# Altium integrated library Altium_Power_Supply_IC.IntLib: 99 symbols (part 1 of 3)
Pins are listed as number, name and electrical type; pins without a type are passive.

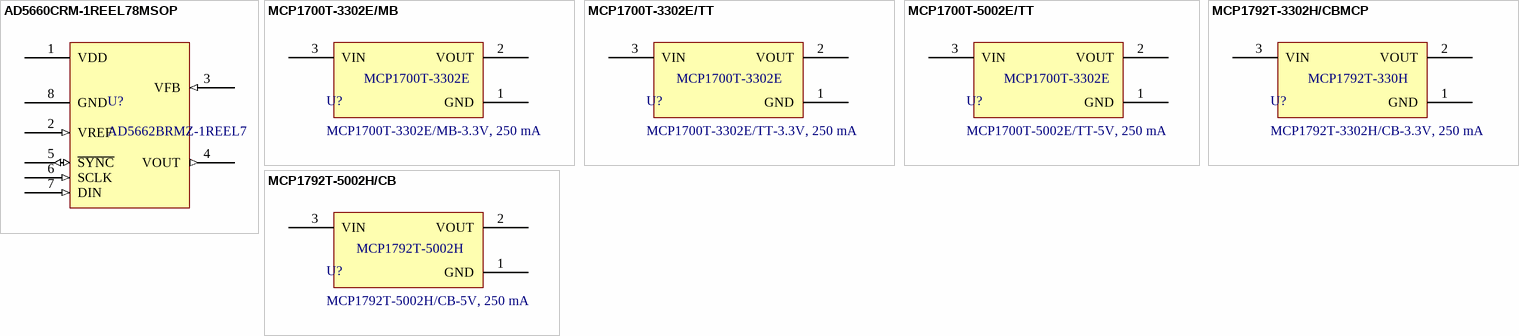
[diagram p0: symbols AD5660CRM-1REEL78MSOP to MCP1792T-5002H/CB]

## AD5660CRM-1REEL78MSOP
designator U?, comment AD5662BRMZ-1REEL7
IC DAC 16BIT V-OUT 8MSOP,; Manufacturer: Analog Devices; Number of Converters: 1; Power Dissipation: 5 mW; Sampling Rate: 125 kS/s; Supply Voltage - Max: 5.5 V; Supply Voltage - Min: 2.7 V; Resolution: 16 bit; Supplier 1 URL: https://www.mouser.vn/ProductDetail/Analog-Devices/AD5662BRMZ-1REEL7?qs=NmRFExCfTkGSnX5okAm7Ig%3D%3D; Supplier 2 URL: https://www.digikey.com/en/products/detail/analog-devices-inc/ad5662brmz-1reel7/1198991; Supplier 3 URL: N/A; Value: AD5662BRMZ-1REEL7; Supplier 1: Mouser; Supplier 1 Part Number: 584-AD5662BRMZ-1R7; Supplier 2: Digi-Key; Supplier 2 Part Number: AD5662BRMZ-1REEL7TR-ND; Supplier 3: thegioiic; Supplier 3 Part Number: N/A; Manufacturer Part Number: AD5662BRMZ-1REEL7; Mount: SMD/SMT; Operating Temperature Max: + 85 C; Operating Temperature Min: - 40 C; Package / Case: MSOP-8; Packaging: Tape and Reel; ComponentLink1Description: Datasheet; ComponentLink1URL: https://www.analog.com/media/en/technical-documentation/data-sheets/AD5620_5640_5660.pdf
footprint AD5662xx family (TSOP, 8-Leads, Body 3.00x3.00mm, Pitch 0.65mm, IPC Medium Density)
pins: 1 VDD (power), 2 VREF (in), 3 VFB (in), 4 VOUT (out), 5 ~{SYNC} (io), 6 SCLK (in), 7 DIN (in), 8 GND (power)

## MCP1700T-3302E/MB
designator U?, comment MCP1700T-3302E/MB-3.3V, 250 mA
LDO Voltage Regulators 250mA Adj LDO 2%; Manufacturer: Microchip Technology; Voltage Input: 2.3V - 6V; Voltage Output: 3.3V; Manufacturer Part Number: MCP1700T-3302E/MB; Current Output: 250mA; Supplier 1 URL: https://www.mouser.com/ProductDetail/Microchip-Technology/MCP1700T-3302E-MB?qs=WWgnj3qycfnlJJhwyn%2Fifw%3D%3D; Supplier 2 URL: https://www.digikey.com/en/products/detail/microchip-technology/MCP1700T-3302E-MB/652678; Supplier 3 URL: https://www.thegioiic.com/mcp1700t-3302e-mb-ic-on-ap-3-3v-250ma; Value: MCP1700T-3302E/MB-3.3V, 250 mA; Mount: SMD/SMT; Operating Temperature Max: + 85 C; Operating Temperature Min: - 40 C; Packaging: Tape and Reel; Supplier 1: Mouser; Supplier 1 Part Number: 579-MCP1700T3302E/MB; Supplier 2: Digi-Key; Supplier 2 Part Number: MCP1700T3302EMBTR-ND; Supplier 3: thegioiic; Supplier 3 Part Number: N/A; ComponentLink1Description: Datasheet; ComponentLink1URL: https://www.mouser.com/datasheet/2/268/MCP1700_Data_Sheet_20001826F-737536.pdf
footprint MCP1700T-3302E/MB (SOT89, 3-Leads, Body 4.50x2.21mm, Pitch 1.50mm, Lead Span 4.1mm)
pins: 1 GND (power), 2 VOUT (power), 3 VIN (power)
text: MCP1700T-3302E

## MCP1700T-3302E/TT
designator U?, comment MCP1700T-3302E/TT-3.3V, 250 mA
Linear Voltage Regulator IC Positive Fixed 1 Output 250mA SOT-23-3; Manufacturer: Microchip Technology; Voltage Input: 2.3V - 6V; Voltage Output: 3.3V; Manufacturer Part Number: MCP1700T-3302E/TT; Current Output: 250mA; Supplier 1 URL: https://www.mouser.com/ProductDetail/Microchip-Technology/MCP1700T-3302E-TT?qs=fM4xO01eazPmCNDrdHEdaw%3D%3D; Supplier 2 URL: https://www.digikey.com/en/products/detail/microchip-technology/MCP1700T-3302E-TT/652676; Supplier 3 URL: https://www.thegioiic.com/mcp1700t-3302e-ic-on-ap-3-3v-250ma; Value: MCP1700T-3302E/TT-3.3V, 250 mA; Mount: SMD/SMT; Operating Temperature Max: + 85 C; Operating Temperature Min: - 40 C; Packaging: Tape and Reel; Supplier 1: Mouser; Supplier 1 Part Number: 579-MCP1700T3302E/TT; Supplier 2: Digi-Key; Supplier 2 Part Number: MCP1700T3302ETTTR-ND; Supplier 3: thegioiic; Supplier 3 Part Number: N/A; ComponentLink1Description: Datasheet; ComponentLink1URL: https://www.mouser.com/datasheet/2/268/MCP1700_Data_Sheet_20001826F-737536.pdf
footprint MCP1700T-3302E/TT (SOT23, 3-Leads, Body 2.86x2.37mm, Pitch 0.95mm)
pins: 1 GND (power), 2 VOUT (power), 3 VIN (power)
text: MCP1700T-3302E

## MCP1700T-5002E/TT
designator U?, comment MCP1700T-5002E/TT-5V, 250 mA
IC REG LINEAR 5V 250MA SOT23-3; Manufacturer: Microchip Technology; Voltage Input: 2.3V - 6V; Manufacturer Part Number: MCP1700T-5002E/TT; Voltage Output: 5V; Current Output: 250mA; Supplier 1 URL: https://www.mouser.com/ProductDetail/Microchip-Technology/MCP1700T-5002E-TT?qs=fM4xO01eazNr4AnStMRB%2Fg%3D%3D; Supplier 2 URL: https://www.digikey.com/en/products/detail/microchip-technology/MCP1700T-5002E-TT/652681; Supplier 3 URL: https://www.thegioiic.com/mcp1700t-5002e-mb-ic-on-ap-5v-250ma; Value: MCP1700T-5002E/TT-5V, 250 mA; Mount: SMD/SMT; Operating Temperature Max: + 85 C; Operating Temperature Min: - 40 C; Packaging: Tape and Reel; Supplier 1: Mouser; Supplier 1 Part Number: 579-MCP1700T5002E/TT; Supplier 2: Digi-Key; Supplier 2 Part Number: MCP1700T5002ETTTR-ND; Supplier 3: thegioiic; Supplier 3 Part Number: N/A; ComponentLink1Description: Datasheet; ComponentLink1URL: https://www.mouser.com/datasheet/2/268/MCP1700_Data_Sheet_20001826F-737536.pdf
footprint MCP1700T-5002E/TT (SOT23, 3-Leads, Body 2.86x2.37mm, Pitch 0.95mm)
pins: 1 GND (power), 2 VOUT (power), 3 VIN (power)
text: MCP1700T-3302E

## MCP1792T-3302H/CBMCP
designator U?, comment MCP1792T-3302H/CB-3.3V, 250 mA
LDO Voltage Regulators High input voltage regulator 3.3V 3Ld SOT-23A TR.; Manufacturer: Microchip Technology; Voltage Input: 4.5V - 55V; Current Output: 100mA; Manufacturer Part Number: MCP1792T-3302H/CB; Voltage Output: 3.3V; Supplier 1 URL: https://www.mouser.com/ProductDetail/Microchip-Technology/MCP1792T-3302H-CB?qs=mAH9sUMRCtsJR7ybQ6HmQA%3D%3D; Supplier 2 URL: https://www.digikey.com/en/products/detail/microchip-technology/MCP1792T-3302H-CB/10297921; Supplier 3 URL: N/A; Value: MCP1792T-3302H/CB-3.3V, 250 mA; Mount: SMD/SMT; Operating Temperature Max: + 85 C; Operating Temperature Min: - 40 C; Packaging: Tape and Reel; Supplier 1: Mouser; Supplier 1 Part Number: 579-MCP1792T-3302HCB; Supplier 2: Digi-Key; Supplier 2 Part Number: MCP1792T-3302H/CBTR-ND; Supplier 3: thegioiic; Supplier 3 Part Number: N/A; ComponentLink1Description: Datasheet; ComponentLink1URL: https://www.mouser.com/datasheet/2/268/MCP1792_Family_Data_Sheet_DS20006229D-2891803.pdf
footprint MCP1792T-3302H/CB (SOT23, 3-Leads, Body 2.90x2.55mm, Pitch 0.95mm)
pins: 1 GND (power), 2 VOUT (power), 3 VIN (power)
text: MCP1792T-330H

## MCP1792T-5002H/CB
designator U?, comment MCP1792T-5002H/CB-5V, 250 mA
LDO Voltage Regulators High input voltage regulator 5.0 V 3Ld SOT-23A TR; Manufacturer: Microchip Technology; Voltage Input: 4.5V - 55V; Voltage Output: 5V; Current Output: 100mA; Manufacturer Part Number: MCP1792T-5002H/CB; Supplier 1 URL: https://www.mouser.com/ProductDetail/Microchip-Technology/MCP1792T-5002H-CB?qs=mAH9sUMRCtuAXaaRege0yg%3D%3D; Supplier 2 URL: https://www.digikey.com/en/products/detail/microchip-technology/MCP1792T-5002H-CB/10297923; Supplier 3 URL: N/A; Value: MCP1792T-5002H/CB-5V, 250 mA; Mount: SMD/SMT; Operating Temperature Max: + 85 C; Operating Temperature Min: - 40 C; Packaging: Tape and Reel; Supplier 1: Mouser; Supplier 1 Part Number: 579-MCP1792T-5002HCB; Supplier 2: Digi-Key; Supplier 2 Part Number: MCP1792T-5002H/CBTR-ND; Supplier 3: thegioiic; Supplier 3 Part Number: N/A; ComponentLink1Description: Datasheet; ComponentLink1URL: https://www.mouser.com/datasheet/2/268/MCP1792_Family_Data_Sheet_DS20006229D-2891803.pdf
footprint MCP1792T-5002HCB (SOT23, 3-Leads, Body 2.90x2.55mm, Pitch 0.95mm)
pins: 1 GND (power), 2 VOUT (power), 3 VIN (power)
text: MCP1792T-5002H


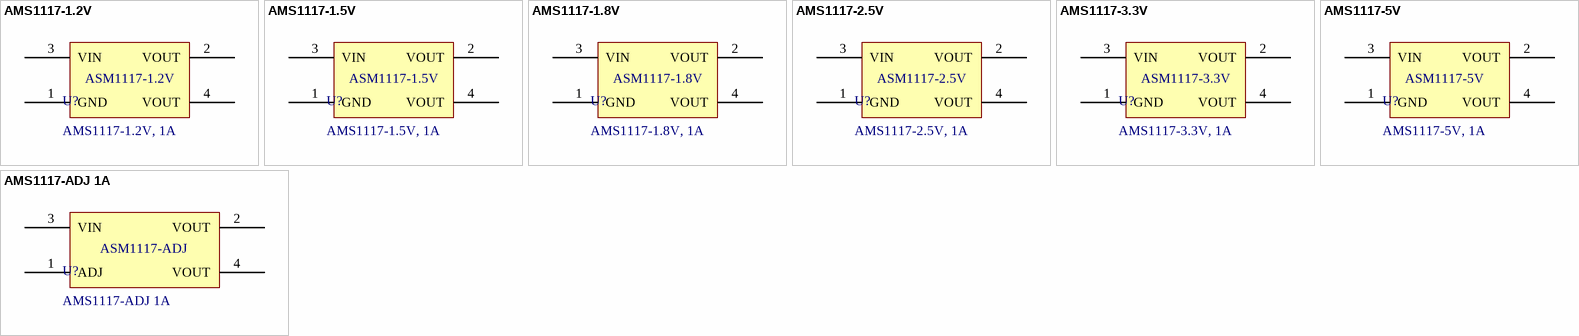
[diagram p1: symbols AMS1117-1.2V to AMS1117-ADJ 1A]

## AMS1117-1.2V
designator U?, comment AMS1117-1.2V, 1A
AMS1117-1.2V, OUT 1.2V 1A.; Manufacturer: AMS; Pad Count: 4; Voltage Input Maximum: 15V; Manufacturer Part Number: N/A; Current Input Maximum: N/A; Current Output Maximum: 1A; Voltage Output: 1.2V; Supplier 1 URL: N/A; Supplier 2 URL: N/A; Supplier 3 URL: https://www.thegioiic.com/ams1117-1-2v-ic-on-ap-1-2v-1a-sot-223; Value: AMS1117-1.2V, 1A; Mount: SMD/SMT; Operating Temperature Max: + 85 C; Operating Temperature Min: - 40 C; Packaging: Tape and Reel; Supplier 1: Mouser; Supplier 1 Part Number: N/A; Supplier 2: Digi-Key; Supplier 2 Part Number: N/A; Supplier 3: thegioiic; Supplier 3 Part Number: N/A; ComponentLink1Description: Datasheet; ComponentLink1URL: N/A; LCSC Part #: N/A
footprint AMS1117-1.2V SOT223 (SOT223, 4-Leads, Body 6.51x7.00mm, Pitch 2.29mm)
pins: 1 GND (power), 2 VOUT, 3 VIN, 4 VOUT (power)
text: ASM1117-1.2V

## AMS1117-1.5V
designator U?, comment AMS1117-1.5V, 1A
AMS1117-1.5V, OUT 1.5V 1A.; Manufacturer: AMS; Pad Count: 4; Voltage Input Maximum: 15V; Manufacturer Part Number: N/A; Current Input Maximum: N/A; Current Output Maximum: 1A; Voltage Output: 1.5V; Supplier 1 URL: N/A; Supplier 2 URL: N/A; Supplier 3 URL: https://www.thegioiic.com/ams1117-1-5v-ic-on-ap-1-5v-1a-sot-223; Value: AMS1117-1.5V, 1A; Mount: SMD/SMT; Operating Temperature Max: + 85 C; Operating Temperature Min: - 40 C; Packaging: Tape and Reel; Supplier 1: Mouser; Supplier 1 Part Number: N/A; Supplier 2: Digi-Key; Supplier 2 Part Number: N/A; Supplier 3: thegioiic; Supplier 3 Part Number: N/A; ComponentLink1Description: Datasheet; ComponentLink1URL: http://www.ams-semitech.com/attachments/File/AMS1117_20120314.pdf; LCSC Part #: N/A
footprint AMS1117-1.5V SOT223 (SOT223, 4-Leads, Body 6.51x7.00mm, Pitch 2.29mm)
pins: 1 GND (power), 2 VOUT, 3 VIN, 4 VOUT (power)
text: ASM1117-1.5V

## AMS1117-1.8V
designator U?, comment AMS1117-1.8V, 1A
AMS1117-1.8V, OUT 1.8V 1A.; Manufacturer: AMS; Pad Count: 4; Voltage Input Maximum: 15V; Manufacturer Part Number: N/A; Current Input Maximum: N/A; Current Output Maximum: 1A; Voltage Output: 1.8V; Supplier 1 URL: N/A; Supplier 2 URL: N/A; Supplier 3 URL: https://www.thegioiic.com/ams1117-1-8v-ic-on-ap-1-8v-1a-sot-223; Value: AMS1117-1.8V, 1A; Mount: SMD/SMT; Operating Temperature Max: + 85 C; Operating Temperature Min: - 40 C; Packaging: Tape and Reel; Supplier 1: Mouser; Supplier 1 Part Number: N/A; Supplier 2: Digi-Key; Supplier 2 Part Number: N/A; Supplier 3: thegioiic; Supplier 3 Part Number: N/A; ComponentLink1Description: Datasheet; ComponentLink1URL: N/A; LCSC Part #: N/A
footprint AMS1117-1.8V SOT223 (SOT223, 4-Leads, Body 6.51x7.00mm, Pitch 2.29mm)
pins: 1 GND (power), 2 VOUT, 3 VIN, 4 VOUT (power)
text: ASM1117-1.8V

## AMS1117-2.5V
designator U?, comment AMS1117-2.5V, 1A
AMS1117-2.5V, OUT 2.5V 1A.; Manufacturer: AMS; Pad Count: 4; Voltage Input Maximum: 15V; Manufacturer Part Number: N/A; Current Input Maximum: N/A; Current Output Maximum: 1A; Voltage Output: 2.5V; Supplier 1 URL: N/A; Supplier 2 URL: N/A; Supplier 3 URL: https://www.thegioiic.com/ams1117-2-5v-ic-on-ap-2-5v-1a-sot-223; Value: AMS1117-2.5V, 1A; Mount: SMD/SMT; Operating Temperature Max: + 85 C; Operating Temperature Min: - 40 C; Packaging: Tape and Reel; Supplier 1: Mouser; Supplier 1 Part Number: N/A; Supplier 2: Digi-Key; Supplier 2 Part Number: N/A; Supplier 3: thegioiic; Supplier 3 Part Number: N/A; ComponentLink1Description: Datasheet; ComponentLink1URL: http://www.advanced-monolithic.com/pdf/ds1117.pdf; LCSC Part #: N/A
footprint AMS1117-2.5V SOT223 (SOT223, 4-Leads, Body 6.51x7.00mm, Pitch 2.29mm)
pins: 1 GND (power), 2 VOUT, 3 VIN, 4 VOUT (power)
text: ASM1117-2.5V

## AMS1117-3.3V
designator U?, comment AMS1117-3.3V, 1A
AMS1117-3.3V, OUT 3.3V 1A.; Manufacturer: AMS; Pad Count: 4; Voltage Input Maximum: 15V; Manufacturer Part Number: N/A; Current Input Maximum: N/A; Current Output Maximum: 1A; Voltage Output: 3.3V; Supplier 1 URL: N/A; Supplier 2 URL: N/A; Supplier 3 URL: https://www.thegioiic.com/ams1117-3-3v-ic-on-ap-3-3v-1a-sot-223; Value: AMS1117-3.3V, 1A; Mount: SMD/SMT; Operating Temperature Max: + 85 C; Operating Temperature Min: - 40 C; Packaging: Tape and Reel; Supplier 1: Mouser; Supplier 1 Part Number: N/A; Supplier 2: Digi-Key; Supplier 2 Part Number: N/A; Supplier 3: thegioiic; Supplier 3 Part Number: N/A; ComponentLink1Description: Datasheet; ComponentLink1URL: http://www.advanced-monolithic.com/pdf/ds1117.pdf; LCSC Part #: C347222
footprint AMS1117-3.3V SOT223 (SOT223, 4-Leads, Body 6.51x7.00mm, Pitch 2.29mm)
pins: 1 GND (power), 2 VOUT, 3 VIN, 4 VOUT (power)
text: ASM1117-3.3V

## AMS1117-5V
designator U?, comment AMS1117-5V, 1A
AMS1117-5V, OUT 5V 1A.; Manufacturer: AMS; Pad Count: 4; Voltage Input Maximum: 15V; Manufacturer Part Number: N/A; Current Input Maximum: N/A; Current Output Maximum: 1A; Voltage Output: 5V; Supplier 1 URL: N/A; Supplier 2 URL: N/A; Supplier 3 URL: https://www.thegioiic.com/ams1117-5-0v-ic-on-ap-5v-1a-sot-223; Value: AMS1117-5V, 1A; Mount: SMD/SMT; Operating Temperature Max: + 85 C; Operating Temperature Min: - 40 C; Packaging: Tape and Reel; Supplier 1: Mouser; Supplier 1 Part Number: N/A; Supplier 2: Digi-Key; Supplier 2 Part Number: N/A; Supplier 3: thegioiic; Supplier 3 Part Number: N/A; ComponentLink1Description: Datasheet; ComponentLink1URL: N/A; LCSC Part #: N/A
footprint AMS1117-5V SOT223 (SOT223, 4-Leads, Body 6.51x7.00mm, Pitch 2.29mm)
pins: 1 GND (power), 2 VOUT, 3 VIN, 4 VOUT (power)
text: ASM1117-5V

## AMS1117-ADJ 1A
designator U?
AMS1117-ADJ, OUT 1.2V-5V 800mA, IN 15V 1A; Manufacturer: UMW; Manufacturer Part Number: AMS1117-1.2; Pad Count: 4; Voltage Output: 1.2 - 5V; Current Input Maximum: 1A; Current Output Maximum: 800mA; Voltage Input Maximum: 15V; Supplier 1 URL: N/A; Supplier 2 URL: https://www.digikey.com/en/products/detail/umw/AMS1117-1-2/17635209; Supplier 3 URL: https://www.thegioiic.com/ams1117-adj-ic-dieu-chinh-dien-ap-1a-sot-223; Value: AMS1117-ADJ 1A; Mount: SMD/SMT; Operating Temperature Max: + 85 C; Operating Temperature Min: - 40 C; Packaging: Tape and Reel; Supplier 1: Mouser; Supplier 1 Part Number: N/A; Supplier 2: Digi-Key; Supplier 2 Part Number: 4518-AMS1117-1.2TR-ND; Supplier 3: thegioiic; Supplier 3 Part Number: N/A; ComponentLink1Description: Datasheet; ComponentLink1URL: https://media.digikey.com/pdf/Data%20Sheets/UTD%20Semi%20PDFs/AMS1117.pdf; LCSC Part #: N/A
footprint AMS1117-ADJ SOT223 (SOT223, 4-Leads, Body 6.51x7.00mm, Pitch 2.29mm)
pins: 1 ADJ (power), 2 VOUT, 3 VIN, 4 VOUT (power)
text: ASM1117-ADJ


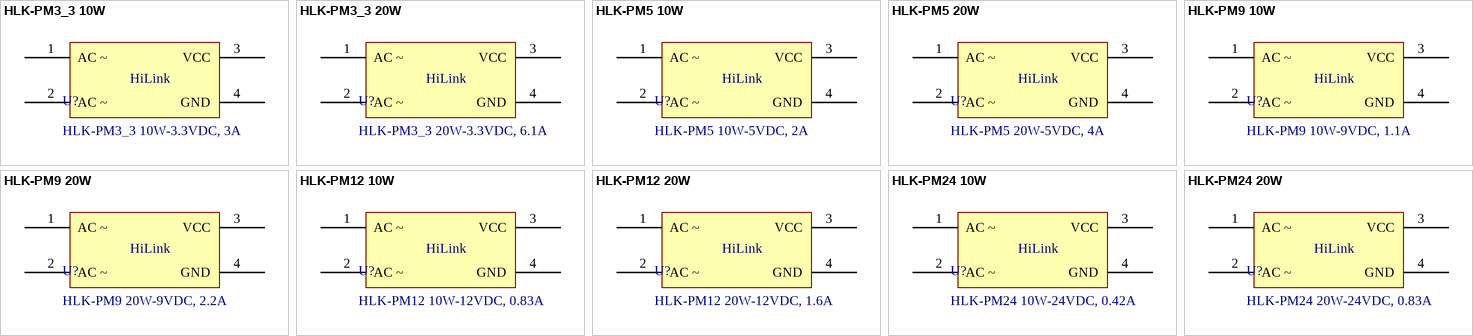
[diagram p2: symbols HLK-PM3_3 10W to HLK-PM24 20W]

## HLK-PM3_3 10W
designator U?, comment HLK-PM3_3 10W-3.3VDC, 3A
HLK-PM3_3 AC-DC 220-3.3V 10W; Manufacturer: Hi-Link Electronic; Voltage Output: 3.3VDC; Voltage Input: 220VAC; Current Output: 3A; Power Output: 10W; ComponentLink1URL: https://www.hlktech.com/en/Product/Details/29; Supplier 1 URL: N/A; Supplier 2 URL: N/A; Supplier 3 SN: HLK-PM3_3 10W; Supplier 3 URL: N/A; Value: HLK-PM3_3 10W-3.3VDC, 3A; Manufacturer Part Number: HLK-PM3_3 AC-DC 220-3.3V 10W; Mount: THT; Operating Temperature Max: + 85 C; Operating Temperature Min: - 40 C; Packaging: Tape and Reel; Supplier 1: Mouser; Supplier 1 Part Number: N/A; Supplier 2: Digi-Key; Supplier 2 Part Number: N/A; Supplier 3: thegioiic; Supplier 3 Part Number: N/A; ComponentLink1Description: Datasheet
footprint HLK-10M
pins: 1 AC ~, 2 AC ~, 3 VCC, 4 GND
text: HiLink

## HLK-PM3_3 20W
designator U?, comment HLK-PM3_3 20W-3.3VDC, 6.1A
HLK-PM3_3 AC-DC 220-3.3V 20W; Manufacturer: Hi-Link Electronic; Voltage Input: 220VAC; Voltage Output: 3.3VDC; Current Output: 6.1A; Power Output: 20W; ComponentLink1URL: https://www.hlktech.com/en/Goods-49.html; Supplier 1 URL: N/A; Supplier 2 URL: N/A; Supplier 3 SN: HLK-PM3_3 20W; Supplier 3 URL: N/A; Value: HLK-PM3_3 20W-3.3VDC, 6.1A; Manufacturer Part Number: HLK-PM3_3 AC-DC 220-3.3V 20W; Mount: THT; Operating Temperature Max: + 85 C; Operating Temperature Min: - 40 C; Packaging: Tape and Reel; Supplier 1: Mouser; Supplier 1 Part Number: N/A; Supplier 2: Digi-Key; Supplier 2 Part Number: N/A; Supplier 3: thegioiic; Supplier 3 Part Number: N/A; ComponentLink1Description: Datasheet
footprint HLK-20M
pins: 1 AC ~, 2 AC ~, 3 VCC, 4 GND
text: HiLink

## HLK-PM5 10W
designator U?, comment HLK-PM5 10W-5VDC, 2A
HLK-PM5 AC-DC 220-5V 10W; Manufacturer: Hi-Link Electronic; Voltage Input: 220VAC; Voltage Output: 5VDC; Power Output: 10W; Current Output: 2A; ComponentLink1URL: https://www.hlktech.com/en/Product/Details/29; Supplier 1 URL: N/A; Supplier 2 URL: N/A; Supplier 3 SN: HLK-PM5 10W; Supplier 3 URL: N/A; Value: HLK-PM5 10W-5VDC, 2A; Manufacturer Part Number: HLK-PM5 AC-DC 220-5V 10W; Mount: THT; Operating Temperature Max: + 85 C; Operating Temperature Min: - 40 C; Packaging: Tape and Reel; Supplier 1: Mouser; Supplier 1 Part Number: N/A; Supplier 2: Digi-Key; Supplier 2 Part Number: N/A; Supplier 3: thegioiic; Supplier 3 Part Number: N/A; ComponentLink1Description: Datasheet
footprint HLK-10M
pins: 1 AC ~, 2 AC ~, 3 VCC, 4 GND
text: HiLink

## HLK-PM5 20W
designator U?, comment HLK-PM5 20W-5VDC, 4A
HLK-PM5 AC-DC 220-5V 20W; Manufacturer: Hi-Link Electronic; Voltage Input: 220VAC; Voltage Output: 5VDC; Power Output: 20W; Current Output: 4A; ComponentLink1URL: https://www.hlktech.com/en/Goods-49.html; Supplier 1 URL: N/A; Supplier 2 URL: N/A; Supplier 3 SN: HLK-PM5 20W; Supplier 3 URL: N/A; Value: HLK-PM5 20W-5VDC, 4A; Manufacturer Part Number: HLK-PM5 AC-DC 220-5V 20W; Mount: THT; Operating Temperature Max: + 85 C; Operating Temperature Min: - 40 C; Packaging: Tape and Reel; Supplier 1: Mouser; Supplier 1 Part Number: N/A; Supplier 2: Digi-Key; Supplier 2 Part Number: N/A; Supplier 3: thegioiic; Supplier 3 Part Number: N/A; ComponentLink1Description: Datasheet
footprint HLK-20M
pins: 1 AC ~, 2 AC ~, 3 VCC, 4 GND
text: HiLink

## HLK-PM9 10W
designator U?, comment HLK-PM9 10W-9VDC, 1.1A
HLK-PM9 AC-DC 220-9V 10W; Manufacturer: Hi-Link Electronic; Voltage Input: 220VAC; Voltage Output: 9VDC; Power Output: 10W; Current Output: 1.1A; ComponentLink1URL: https://www.hlktech.com/en/Product/Details/29; Supplier 1 URL: N/A; Supplier 2 URL: N/A; Supplier 3 SN: HLK-PM9 10W; Supplier 3 URL: N/A; Value: HLK-PM9 10W-9VDC, 1.1A; Manufacturer Part Number: HLK-PM9 AC-DC 220-9V 10W; Mount: THT; Operating Temperature Max: + 85 C; Operating Temperature Min: - 40 C; Packaging: Tape and Reel; Supplier 1: Mouser; Supplier 1 Part Number: N/A; Supplier 2: Digi-Key; Supplier 2 Part Number: N/A; Supplier 3: thegioiic; Supplier 3 Part Number: N/A; ComponentLink1Description: Datasheet
footprint HLK-10M
pins: 1 AC ~, 2 AC ~, 3 VCC, 4 GND
text: HiLink

## HLK-PM9 20W
designator U?, comment HLK-PM9 20W-9VDC, 2.2A
HLK-PM9 AC-DC 220-9V 20W; Manufacturer: Hi-Link Electronic; Voltage Input: 220VAC; Voltage Output: 9VDC; Power Output: 20W; Current Output: 2.2A; ComponentLink1URL: https://www.hlktech.com/en/Goods-49.html; Supplier 1 URL: N/A; Supplier 2 URL: N/A; Supplier 3 SN: HLK-PM9 20W; Supplier 3 URL: N/A; Value: HLK-PM9 20W-9VDC, 2.2A; Manufacturer Part Number: HLK-PM9 AC-DC 220-9V 20W; Mount: THT; Operating Temperature Max: + 85 C; Operating Temperature Min: - 40 C; Packaging: Tape and Reel; Supplier 1: Mouser; Supplier 1 Part Number: N/A; Supplier 2: Digi-Key; Supplier 2 Part Number: N/A; Supplier 3: thegioiic; Supplier 3 Part Number: N/A; ComponentLink1Description: Datasheet
footprint HLK-20M
pins: 1 AC ~, 2 AC ~, 3 VCC, 4 GND
text: HiLink

## HLK-PM12 10W
designator U?, comment HLK-PM12 10W-12VDC, 0.83A
HLK-PM12 AC-DC 220-12V 10W; Manufacturer: Hi-Link Electronic; Voltage Input: 220VAC; Voltage Output: 12VDC; Power Output: 10W; Current Output: 0.83A; ComponentLink1URL: https://www.hlktech.com/en/Product/Details/29; Supplier 1 URL: N/A; Supplier 2 URL: N/A; Supplier 3 SN: HLK-PM12 10W; Supplier 3 URL: N/A; Value: HLK-PM12 10W-12VDC, 0.83A; Manufacturer Part Number: HLK-PM12 AC-DC 220-12V 10W; Mount: THT; Operating Temperature Max: + 85 C; Operating Temperature Min: - 40 C; Packaging: Tape and Reel; Supplier 1: Mouser; Supplier 1 Part Number: N/A; Supplier 2: Digi-Key; Supplier 2 Part Number: N/A; Supplier 3: thegioiic; Supplier 3 Part Number: N/A; ComponentLink1Description: Datasheet
footprint HLK-10M
pins: 1 AC ~, 2 AC ~, 3 VCC, 4 GND
text: HiLink

## HLK-PM12 20W
designator U?, comment HLK-PM12 20W-12VDC, 1.6A
HLK-PM12 AC-DC 220-12V 20W; Manufacturer: Hi-Link Electronic; Voltage Input: 220VAC; Voltage Output: 12VDC; Power Output: 20W; Current Output: 1.6A; ComponentLink1URL: https://www.hlktech.com/en/Goods-49.html; Supplier 1 URL: N/A; Supplier 2 URL: N/A; Supplier 3 SN: HLK-PM12 20W; Supplier 3 URL: N/A; Value: HLK-PM12 20W-12VDC, 1.6A; Manufacturer Part Number: HLK-PM12 AC-DC 220-12V 20W; Mount: THT; Operating Temperature Max: + 85 C; Operating Temperature Min: - 40 C; Packaging: Tape and Reel; Supplier 1: Mouser; Supplier 1 Part Number: N/A; Supplier 2: Digi-Key; Supplier 2 Part Number: N/A; Supplier 3: thegioiic; Supplier 3 Part Number: N/A; ComponentLink1Description: Datasheet
footprint HLK-20M
pins: 1 AC ~, 2 AC ~, 3 VCC, 4 GND
text: HiLink

## HLK-PM24 10W
designator U?, comment HLK-PM24 10W-24VDC, 0.42A
HLK-PM24 AC-DC 220-24V 10W; Manufacturer: Hi-Link Electronic; Voltage Input: 220VAC; Voltage Output: 24VDC; Power Output: 10W; Current Output: 0.42A; ComponentLink1URL: https://www.hlktech.com/en/Product/Details/29; Supplier 1 URL: N/A; Supplier 2 URL: N/A; Supplier 3 SN: HLK-PM24 10W; Supplier 3 URL: N/A; Value: HLK-PM24 10W-24VDC, 0.42A; Manufacturer Part Number: HLK-PM24 AC-DC 220-24V 10W; Mount: THT; Operating Temperature Max: + 85 C; Operating Temperature Min: - 40 C; Packaging: Tape and Reel; Supplier 1: Mouser; Supplier 1 Part Number: N/A; Supplier 2: Digi-Key; Supplier 2 Part Number: N/A; Supplier 3: thegioiic; Supplier 3 Part Number: N/A; ComponentLink1Description: Datasheet
footprint HLK-10M
pins: 1 AC ~, 2 AC ~, 3 VCC, 4 GND
text: HiLink

## HLK-PM24 20W
designator U?, comment HLK-PM24 20W-24VDC, 0.83A
HLK-PM24 AC-DC 220-24V 10W; Manufacturer: Hi-Link Electronic; Power Output: 20W; Voltage Input: 220VAC; Voltage Output: 24VDC; Current Output: 0.83A; ComponentLink1URL: https://www.hlktech.com/en/Goods-49.html; Supplier 1 URL: N/A; Supplier 2 URL: N/A; Supplier 3 SN: HLK-PM24 20W; Supplier 3 URL: N/A; Value: HLK-PM24 20W-24VDC, 0.83A; Manufacturer Part Number: HLK-PM24 AC-DC 220-24V 10W; Mount: THT; Operating Temperature Max: + 85 C; Operating Temperature Min: - 40 C; Packaging: Tape and Reel; Supplier 1: Mouser; Supplier 1 Part Number: N/A; Supplier 2: Digi-Key; Supplier 2 Part Number: N/A; Supplier 3: thegioiic; Supplier 3 Part Number: N/A; ComponentLink1Description: Datasheet
footprint HLK-20M
pins: 1 AC ~, 2 AC ~, 3 VCC, 4 GND
text: HiLink


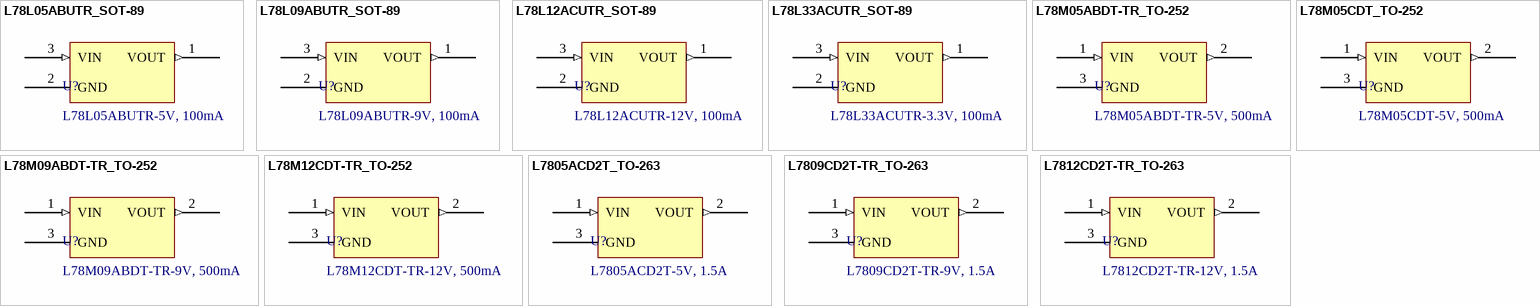
[diagram p3: symbols L78L05ABUTR_SOT-89 to L7812CD2T-TR_TO-263]

## L78L05ABUTR_SOT-89
designator U?, comment L78L05ABUTR-5V, 100mA
Out: 5V, 100mA; In: 7V to 30V; Pacakge: SOT-89; Manufacturer: STMicroelectronics; Voltage Input: 7V - 30V; Voltage Output: 5V; Supplier 1 URL: https://www.mouser.com/ProductDetail/STMicroelectronics/L78L05ABUTR?qs=1feNxqzJ94QQZYRl%252B78DYA%3D%3D; Supplier 2 URL: https://www.digikey.com/en/products/detail/stmicroelectronics/L78L05ABUTR/585705; Supplier 3 URL: https://www.thegioiic.com/l78l05-ic-on-ap-5v-100ma; Value: L78L05ABUTR-5V, 100mA; Current Output: 100mA; Manufacturer Part Number: L78L05ABUTR; Mount: SMD/SMT; Operating Temperature Max: + 85 C; Operating Temperature Min: - 40 C; Package / Case: SOT-89; Packaging: Tape and Reel; Supplier 1: Mouser; Supplier 1 Part Number: 511-L78L05ABU; Supplier 2: Digi-Key; Supplier 2 Part Number: 497-1181-2-ND; Supplier 3: thegioiic; Supplier 3 Part Number: N/A; ComponentLink1Description: Datasheet; ComponentLink1URL: https://www.st.com/resource/en/datasheet/l78l.pdf
footprint SOT-89
pins: 1 VOUT (out), 2 GND, 3 VIN (in)

## L78L09ABUTR_SOT-89
designator U?, comment L78L09ABUTR-9V, 100mA
Out: 9V, 100mA; In: 11V to 30V; Pacakge: SOT-89; Manufacturer: STMicroelectronics; Voltage Input: 11V - 30V; Voltage Output: 9V; Supplier 1 URL: https://www.mouser.com/ProductDetail/STMicroelectronics/L78L09ABUTR?qs=1X5Df8S5MyhPYDpOL9OOJA%3D%3D; Supplier 2 URL: https://www.digikey.com/en/products/detail/stmicroelectronics/L78L09ABUTR/1038278?s=N4IgTCBcDaIDIHYAccAMBOAggIQKoBUAlEAXQF8g; Supplier 3 URL: https://www.thegioiic.com/78l09s-ic-on-ap-9v-100ma; Value: L78L09ABUTR-9V, 100mA; Current Output: 100mA; Manufacturer Part Number: L78L09ABUTR; Mount: SMD/SMT; Operating Temperature Max: + 85 C; Operating Temperature Min: - 40 C; Package / Case: SOT-89; Packaging: Tape and Reel; Supplier 1: Mouser; Supplier 1 Part Number: 511-L78L09ABU-TR; Supplier 2: Digi-Key; Supplier 2 Part Number: 497-7273-2-ND; Supplier 3: thegioiic; Supplier 3 Part Number: N/A; ComponentLink1Description: Datasheet; ComponentLink1URL: https://www.st.com/resource/en/datasheet/l78l.pdf
footprint SOT-89
pins: 1 VOUT (out), 2 GND, 3 VIN (in)

## L78L12ACUTR_SOT-89
designator U?, comment L78L12ACUTR-12V, 100mA
Out: 12V, 100mA; In: 14V to 35V; Pacakge: SOT-89; Manufacturer: STMicroelectronics; Voltage Input: 14V - 35V; Voltage Output: 12V; Supplier 1 URL: https://www.mouser.com/ProductDetail/STMicroelectronics/L78L12ACUTR?qs=lsQ%2Fasl43rq%252BGNm5TGwtyg%3D%3D; Supplier 2 URL: https://www.digikey.com/en/products/detail/stmicroelectronics/L78L12ACUTR/585719?s=N4IgTCBcDaIDIHYAccCMYCCBhAqgFQCUQBdAXyA; Supplier 3 URL: N/A; Value: L78L12ACUTR-12V, 100mA; Current Output: 100mA; Manufacturer Part Number: L78L12ACUTR; Mount: SMD/SMT; Operating Temperature Max: + 85 C; Operating Temperature Min: - 40 C; Package / Case: SOT-89; Packaging: Tape and Reel; Supplier 1: Mouser; Supplier 1 Part Number: 511-L78L12ACU; Supplier 2: Digi-Key; Supplier 2 Part Number: 497-1195-2-ND; Supplier 3: thegioiic; Supplier 3 Part Number: N/A; ComponentLink1Description: Datasheet; ComponentLink1URL: https://www.st.com/resource/en/datasheet/l78l.pdf
footprint SOT-89
pins: 1 VOUT (out), 2 GND, 3 VIN (in)

## L78L33ACUTR_SOT-89
designator U?, comment L78L33ACUTR-3.3V, 100mA
Out: 3.3V, 100mA; In: 5.3V to 30V; Pacakge: SOT-89; Manufacturer: STMicroelectronics; Voltage Input: 5.3V - 30V; Voltage Output: 3.3V; Supplier 1 URL: https://www.mouser.com/ProductDetail/STMicroelectronics/L78L33ACUTR?qs=hDePDv5mxMFi%252BjA%2FaAMQCg%3D%3D; Supplier 2 URL: https://www.digikey.com/en/products/detail/stmicroelectronics/L78L33ACUTR/585724?s=N4IgTCBcDaIDIHYAccDMqCCBhAqgFQCUQBdAXyA; Supplier 3 URL: N/A; Value: L78L33ACUTR-3.3V, 100mA; Current Output: 100mA; Manufacturer Part Number: L78L33ACUTR; Mount: SMD/SMT; Operating Temperature Max: + 85 C; Operating Temperature Min: - 40 C; Package / Case: SOT-89; Packaging: Tape and Reel; Supplier 1: Mouser; Supplier 1 Part Number: 511-L78L33ACU; Supplier 2: Digi-Key; Supplier 2 Part Number: 497-1200-2-ND; Supplier 3: thegioiic; Supplier 3 Part Number: N/A; ComponentLink1Description: Datasheet; ComponentLink1URL: https://www.st.com/resource/en/datasheet/l78l.pdf
footprint SOT-89
pins: 1 VOUT (out), 2 GND, 3 VIN (in)

## L78M05ABDT-TR_TO-252
designator U?, comment L78M05ABDT-TR-5V, 500mA
Out: 5V, 500mA; In: 7V to 35V; Pacakge: TO-252; Manufacturer: STMicroelectronics; Voltage Input: 7V - 35V; Voltage Output: 5V; Supplier 1 URL: https://www.mouser.com/ProductDetail/STMicroelectronics/L78M05ABDT-TR?qs=kdoK93vJZIY3pGnUXsif4w%3D%3D; Supplier 2 URL: https://www.digikey.com/en/products/detail/stmicroelectronics/L78M05ABDT-TR/585725?s=N4IgTCBcDaIDIHYAcBZADAVgIICEAiAKgLQEBKIAugL5A; Supplier 3 URL: https://www.thegioiic.com/l78m05abdt-tr-ic-on-ap-5v-0-5a; Value: L78M05ABDT-TR-5V, 500mA; Current Output: 500mA; Manufacturer Part Number: L78M05ABDT-TR; Mount: SMD/SMT; Operating Temperature Max: + 85 C; Operating Temperature Min: - 40 C; Package / Case: TO-252; Packaging: Tape and Reel; Supplier 1: Mouser; Supplier 1 Part Number: 511-L78M05ABDT-TR; Supplier 2: Digi-Key; Supplier 2 Part Number: 497-1201-2-ND; Supplier 3: thegioiic; Supplier 3 Part Number: N/A; ComponentLink1Description: Datasheet; ComponentLink1URL: https://www.mouser.com/datasheet/2/389/l78m-974157.pdf
footprint TO-252 (D-PAK)
pins: 1 VIN (in), 2 VOUT (out), 3 GND

## L78M05CDT_TO-252
designator U?, comment L78M05CDT-5V, 500mA
Out: 5V, 500mA; In: 7V to 35V; Pacakge: TO-252; Manufacturer: STMicroelectronics; Voltage Input: 7V - 35V; Voltage Output: 5V; Supplier 1 URL: https://www.mouser.com/ProductDetail/STMicroelectronics/L78M05CDT?qs=EYQuxaDwR79rnNxSL0UEZA%3D%3D; Supplier 2 URL: https://www.digikey.com/en/products/detail/stmicroelectronics/L78M05CDT/634720; Supplier 3 URL: https://www.thegioiic.com/l78m05cdt-ic-on-ap-5v-500ma; Value: L78M05CDT-5V, 500mA; Current Output: 500mA; Manufacturer Part Number: L78M05CDT; Mount: SMD/SMT; Operating Temperature Max: + 85 C; Operating Temperature Min: - 40 C; Package / Case: TO-252; Packaging: Tape and Reel; Supplier 1: Mouser; Supplier 1 Part Number: 511-L78M05CDT; Supplier 2: Digi-Key; Supplier 2 Part Number: 497-2956-5-ND; Supplier 3: thegioiic; Supplier 3 Part Number: N/A; ComponentLink1Description: Datasheet; ComponentLink1URL: https://www.mouser.com/datasheet/2/389/l78m-1849664.pdf
footprint TO-252 (D-PAK)
pins: 1 VIN (in), 2 VOUT (out), 3 GND

## L78M09ABDT-TR_TO-252
designator U?, comment L78M09ABDT-TR-9V, 500mA
Out: 9V, 500mA; In: 11V to 35V; Pacakge: TO-252; Manufacturer: STMicroelectronics; Voltage Input: 11V - 35V; Voltage Output: 9V; Supplier 1 URL: https://www.mouser.com/ProductDetail/STMicroelectronics/L78M09ABDT-TR?qs=1MLYYPJBAjHSYObOJcvCaA%3D%3D; Supplier 2 URL: https://www.digikey.com/en/products/detail/stmicroelectronics/L78M09ABDT-TR/1663447?s=N4IgTCBcDaIDIHYAcBZADATgIICEAiAKgLQEBKIAugL5A; Supplier 3 URL: https://www.thegioiic.com/l78m09abdt-tr-ic-on-ap-9v-0-5a; Value: L78M09ABDT-TR-9V, 500mA; Current Output: 500mA; Manufacturer Part Number: L78M09ABDT-TR; Mount: SMD/SMT; Operating Temperature Max: + 85 C; Operating Temperature Min: - 40 C; Package / Case: TO-252; Packaging: Tape and Reel; Supplier 1: Mouser; Supplier 1 Part Number: 511-L78M09ABDT-TR; Supplier 2: Digi-Key; Supplier 2 Part Number: 497-14163-2-ND; Supplier 3: thegioiic; Supplier 3 Part Number: N/A; ComponentLink1Description: Datasheet; ComponentLink1URL: https://www.mouser.com/datasheet/2/389/l78m-974157.pdf
footprint TO-252 (D-PAK)
pins: 1 VIN (in), 2 VOUT (out), 3 GND

## L78M12CDT-TR_TO-252
designator U?, comment L78M12CDT-TR-12V, 500mA
Out: 12V, 500mA; In: 14V to 35V; Pacakge: TO-252; Manufacturer: STMicroelectronics; Voltage Input: 14V - 35V; Voltage Output: 12V; Supplier 1 URL: https://www.mouser.vn/ProductDetail/STMicroelectronics/L78M12CDT-TR?qs=qc0R%252BzdqlhoQMD%252Bqk94JGQ%3D%3D; Supplier 2 URL: https://www.digikey.com/en/products/detail/stmicroelectronics/L78M12CDT-TR/585735?s=N4IgTCBcDaIDIHYAcBZAjGAwgEQCoFpcAlEAXQF8g; Supplier 3 URL: https://www.thegioiic.com/l78m12cdt-tr-ic-on-ap-12v-500ma; Value: L78M12CDT-TR-12V, 500mA; Current Output: 500mA; Manufacturer Part Number: L78M12CDT-TR; Mount: SMD/SMT; Operating Temperature Max: + 85 C; Operating Temperature Min: - 40 C; Package / Case: TO-252; Packaging: Tape and Reel; Supplier 1: Mouser; Supplier 1 Part Number: 511-L78M12CDT-TR; Supplier 2: Digi-Key; Supplier 2 Part Number: 497-1211-2-ND; Supplier 3: thegioiic; Supplier 3 Part Number: N/A; ComponentLink1Description: Datasheet; ComponentLink1URL: https://www.mouser.com/datasheet/2/389/l78m-974157.pdf
footprint TO-252 (D-PAK)
pins: 1 VIN (in), 2 VOUT (out), 3 GND

## L7805ACD2T_TO-263
designator U?, comment L7805ACD2T-5V, 1.5A
Out: 5V, 1.5A; In: 7V to 35V; Pacakge: TO-263; Manufacturer: STMicroelectronics; Voltage Input: 7V - 35V; Voltage Output: 5V; Supplier 1 URL: https://www.mouser.com/ProductDetail/STMicroelectronics/L7805ACD2T-TR?qs=Ctxo64yJVFuOLXlPPZdJUQ%3D%3D; Supplier 2 URL: https://www.digikey.com/en/products/detail/stmicroelectronics/L7805ACD2T-TR/1038230; Supplier 3 URL: https://www.thegioiic.com/l7805acd2t-ic-on-ap-5v-1-5a; Value: L7805ACD2T-5V, 1.5A; Current Output: 1.5A; Manufacturer Part Number: L7805ACD2T; Mount: SMD/SMT; Operating Temperature Max: + 85 C; Operating Temperature Min: - 40 C; Package / Case: TO-263; Packaging: Tape and Reel; Supplier 1: Mouser; Supplier 1 Part Number: 511-L7805ACD2T-TR; Supplier 2: Digi-Key; Supplier 2 Part Number: 497-7253-2-ND; Supplier 3: thegioiic; Supplier 3 Part Number: N/A; ComponentLink1Description: Datasheet; ComponentLink1URL: https://www.st.com/resource/en/datasheet/l78.pdf
footprint TO-263 (D2PAK)
pins: 1 VIN (in), 2 VOUT (out), 3 GND

## L7809CD2T-TR_TO-263
designator U?, comment L7809CD2T-TR-9V, 1.5A
Out: 9V, 1.5A; In: 11V to 35V; Pacakge: TO-263; Manufacturer: STMicroelectronics; Voltage Input: 11V - 35V; Voltage Output: 9V; Supplier 1 URL: https://www.mouser.com/ProductDetail/STMicroelectronics/L7809CD2T-TR?qs=15AzPhfEMg9%2FqG49g2z5xQ%3D%3D; Supplier 2 URL: https://www.digikey.com/en/products/detail/stmicroelectronics/L7809CD2T-TR/585700?s=N4IgTCBcDaIDIHYAcAGAnAYQCJgCoFpcAlEAXQF8g; Supplier 3 URL: N/A; Value: L7809CD2T-TR-9V, 1.5A; Current Output: 1.5A; Manufacturer Part Number: L7809CD2T-TR; Mount: SMD/SMT; Operating Temperature Max: + 85 C; Operating Temperature Min: - 40 C; Package / Case: TO-263; Packaging: Tape and Reel; Supplier 1: Mouser; Supplier 1 Part Number: 511-L7809CD2T-TR; Supplier 2: Digi-Key; Supplier 2 Part Number: 497-1176-2-ND; Supplier 3: thegioiic; Supplier 3 Part Number: N/A; ComponentLink1Description: Datasheet; ComponentLink1URL: https://www.st.com/resource/en/datasheet/l78.pdf
footprint TO-263 (D2PAK)
pins: 1 VIN (in), 2 VOUT (out), 3 GND

## L7812CD2T-TR_TO-263
designator U?, comment L7812CD2T-TR-12V, 1.5A
Out: 12V, 1.5A; In: 14V to 35V; Pacakge: TO-263; Manufacturer: STMicroelectronics; Voltage Input: 14V - 35V; Voltage Output: 12V; Supplier 1 URL: https://www.mouser.vn/ProductDetail/STMicroelectronics/L7812CD2T-TR?qs=St21y7kBsOZRCvbPRwGnTg%3D%3D; Supplier 2 URL: https://www.digikey.com/en/products/detail/stmicroelectronics/L7812CD2T-TR/585702?s=N4IgTCBcDaIDIHYAcBGMBhAImAKgWhwCUQBdAXyA; Supplier 3 URL: https://www.thegioiic.com/l7812cd2t-cn-ic-on-ap-12v-1-5a; Value: L7812CD2T-TR-12V, 1.5A; Current Output: 1.5A; Manufacturer Part Number: L7812CD2T-TR; Mount: SMD/SMT; Operating Temperature Max: + 85 C; Operating Temperature Min: - 40 C; Package / Case: TO-263; Packaging: Tape and Reel; Supplier 1: Mouser; Supplier 1 Part Number: 511-L7812CD2T-TR; Supplier 2: Digi-Key; Supplier 2 Part Number: 497-1178-2-ND; Supplier 3: thegioiic; Supplier 3 Part Number: N/A; ComponentLink1Description: Datasheet; ComponentLink1URL: https://www.st.com/resource/en/datasheet/l78.pdf
footprint TO-263 (D2PAK)
pins: 1 VIN (in), 2 VOUT (out), 3 GND


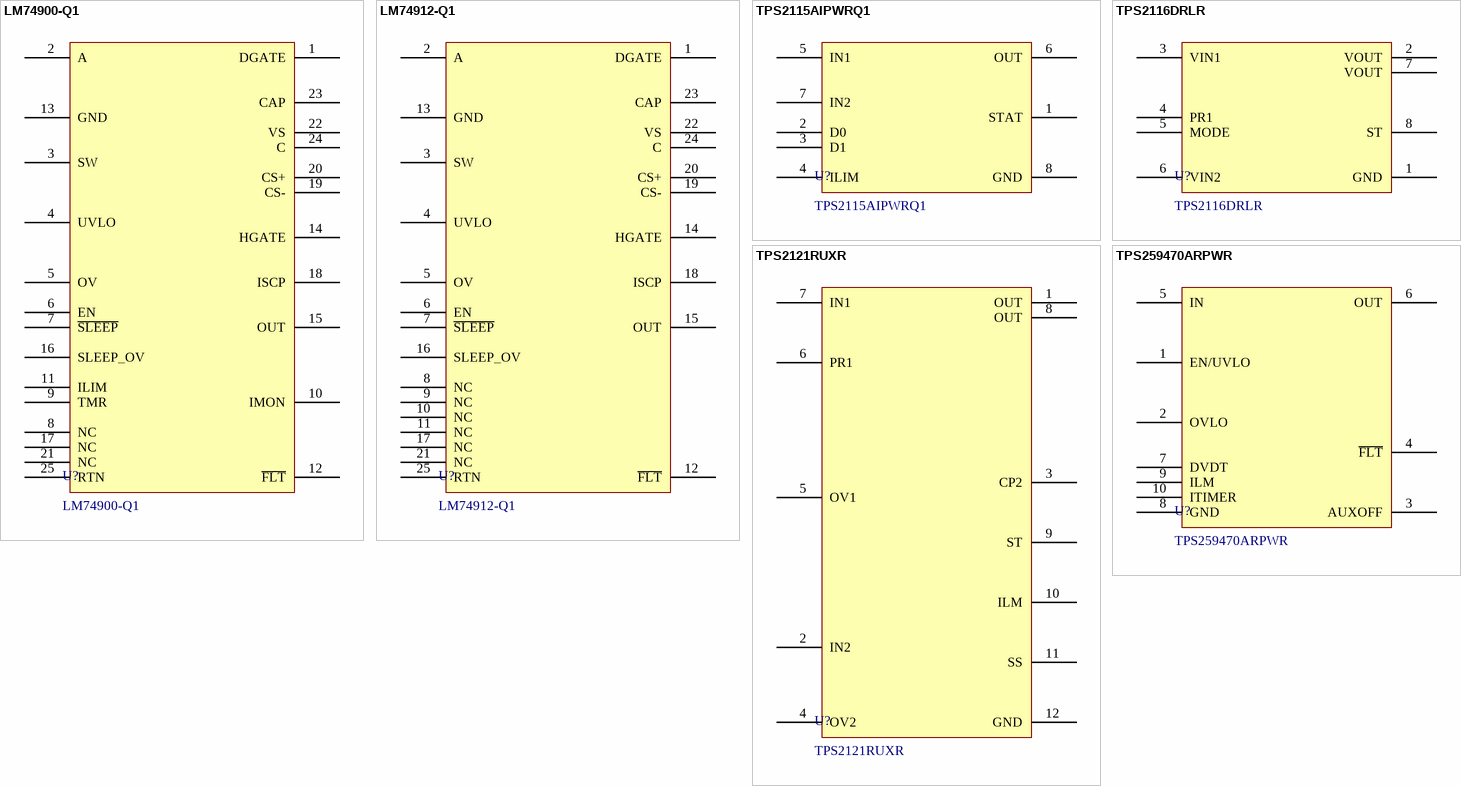
[diagram p4: symbols LM74900-Q1 to TPS259470ARPWR]

## LM74900-Q1
designator U?
Automotive ideal diode with circuit breaker, under- and overvoltage protection with fault output; Manufacturer: Texas Instruments; Input Voltage: 3-65 V; Number of channels: 1; Active status: Active; Device Type: Ideal diode controller; FET: External back-to-back FET; Output Current: N/A; Output Voltage: 3-65 V; Package / Case: VQFN-24; Current limit max: N/A; Ron: N/A; Supplier 1 URL: N/A; Supplier 2 URL: N/A; Supplier 3 URL: N/A; Value: N/A; Manufacturer Part Number: LM74900-Q1; Mount: SMD/SMT; Operating Temperature Max: + 85 C; Operating Temperature Min: - 40 C; Packaging: Tape and Reel; Supplier 1: Mouser; Supplier 1 Part Number: 595-LM74900QRGERQ1; Supplier 2: Digi-Key; Supplier 2 Part Number: 296-LM74900QRGERQ1TR-ND; Supplier 3: thegioiic; Supplier 3 Part Number: N/A; ComponentLink1Description: Datasheet; ComponentLink1URL: https://www.ti.com/lit/gpn/lm74900-q1
footprint LM74900-Q1 (QFN, 24-Leads, Body 4.00x4.00mm, Pitch 0.50mm, Thermal Pad 2.10x2.10mm, IPC Medium Density)
pins: 1 DGATE, 2 A, 3 SW, 4 UVLO, 5 OV, 6 EN, 7 ~{SLEEP}, 8 NC, 9 TMR, 10 IMON, 11 ILIM, 12 ~{FLT}, 13 GND, 14 HGATE, 15 OUT, 16 SLEEP_OV, 17 NC, 18 ISCP, 19 CS-, 20 CS+, 21 NC, 22 VS, 23 CAP, 24 C, 25 RTN

## LM74912-Q1
designator U?
Automotive ideal diode with integrated over-voltage and short circuit protection w/ fault output; Manufacturer: Texas Instruments; Input Voltage: 3-65 V; Number of channels: 1; Active status: Active; Device Type: Ideal diode controller; FET: External back-to-back FET; Output Current: N/A; Output Voltage: 3-65 V; Package / Case: VQFN-24; Current limit max: N/A; Ron: N/A; Supplier 1 URL: N/A; Supplier 2 URL: N/A; Supplier 3 URL: N/A; Value: N/A; Manufacturer Part Number: LM74912-Q1; Mount: SMD/SMT; Operating Temperature Max: + 85 C; Operating Temperature Min: - 40 C; Packaging: Tape and Reel; Supplier 1: Mouser; Supplier 1 Part Number: N/A; Supplier 2: Digi-Key; Supplier 2 Part Number: N/A; Supplier 3: thegioiic; Supplier 3 Part Number: N/A; ComponentLink1Description: Datasheet; ComponentLink1URL: https://www.ti.com/lit/gpn/lm74912-q1
footprint LM74912-Q1 (QFN, 24-Leads, Body 4.00x4.00mm, Pitch 0.50mm, Thermal Pad 2.10x2.10mm, IPC Medium Density)
pins: 1 DGATE, 2 A, 3 SW, 4 UVLO, 5 OV, 6 EN, 7 ~{SLEEP}, 8 NC, 9 NC, 10 NC, 11 NC, 12 ~{FLT}, 13 GND, 14 HGATE, 15 OUT, 16 SLEEP_OV, 17 NC, 18 ISCP, 19 CS-, 20 CS+, 21 NC, 22 VS, 23 CAP, 24 C, 25 RTN

## TPS2115AIPWRQ1
designator U?
2.8-V to 5.5-V, 84-mΩ, 1.25-A, automotive power mux with manual, automatic switchover; Manufacturer: Texas Instruments; Input Voltage: 2.8-5.5V; Number of channels: 1; Output Current: 1.25A; Active status: Active; FET: Internal; Ron: 84 mOhm; Value: 1.25A; Output Voltage: 2.8-5.5V; Package / Case: TSSOP-8; Current limit max: 1.25A; Device Type: Power MUX; Supplier 1 URL: N/A; Supplier 2 URL: N/A; Supplier 3 URL: N/A; Manufacturer Part Number: TPS2115AIPWRQ1; Mount: SMD/SMT; Operating Temperature Max: + 85 C; Operating Temperature Min: - 40 C; Packaging: Tape and Reel; Supplier 1: Mouser; Supplier 1 Part Number: 595-TPS2115AIPWRQ1; Supplier 2: Digi-Key; Supplier 2 Part Number: 296-24155-2-ND; Supplier 3: thegioiic; Supplier 3 Part Number: N/A; ComponentLink1Description: Datasheet; ComponentLink1URL: https://www.ti.com/lit/gpn/TPS2115A-Q1
footprint TPS2115AIPWRQ1 (TSOP, 8-Leads, Body 3.00x4.40mm, Pitch 0.65mm, IPC Medium Density)
pins: 1 STAT, 2 D0, 3 D1, 4 ILIM, 5 IN1, 6 OUT, 7 IN2, 8 GND

## TPS2116DRLR
designator U?
1.6-V to 5.5-V, 40-mOhm, 2.5-A, low-IQ, priority power multiplexer; Manufacturer: Texas Instruments; Input Voltage: 1.6-5.5V; Number of channels: 1; Output Current: 2.5A; Active status: Active; Device Type: Power MUX; FET: Internal; Ron: 40 mOhm; Value: 2.5A; Output Voltage: 1.6-5.5V; Package / Case: SOT-5X3-8; Current limit max: 2.5A; Supplier 1 URL: N/A; Supplier 2 URL: N/A; Supplier 3 URL: N/A; Manufacturer Part Number: TPS2116DRLR; Mount: SMD/SMT; Operating Temperature Max: + 85 C; Operating Temperature Min: - 40 C; Packaging: Tape and Reel; Supplier 1: Mouser; Supplier 1 Part Number: 595-TPS2116DRLR; Supplier 2: Digi-Key; Supplier 2 Part Number: 296-TPS2116DRLRTR-ND; Supplier 3: thegioiic; Supplier 3 Part Number: N/A; ComponentLink1Description: Datasheet; ComponentLink1URL: https://www.ti.com/lit/gpn/TPS2116
footprint TPS2116DRLR (SON, 8-Leads, Body 2.10x1.60mm, Pitch 0.50mm, IPC Medium Density)
pins: 1 GND, 2 VOUT, 3 VIN1, 4 PR1, 5 MODE, 6 VIN2, 7 VOUT, 8 ST

## TPS2121RUXR
designator U?
2.7-V to 22-V, 56-mΩ, 4.5-A, power mux with seamless switchover; Manufacturer: Texas Instruments; Input Voltage: 2.7-22V; Number of channels: 1; Output Current: 4.5A; Active status: Active; FET: Internal; Ron: 56 mOhm; Value: 4.5A; Output Voltage: 2.7-22V; Package / Case: VQFN-12; Current limit max: 4.5A; Device Type: Power MUX; Supplier 1 URL: N/A; Supplier 2 URL: N/A; Supplier 3 URL: N/A; Manufacturer Part Number: TPS2121RUXR; Mount: SMD/SMT; Operating Temperature Max: + 85 C; Operating Temperature Min: - 40 C; Packaging: Tape and Reel; Supplier 1: Mouser; Supplier 1 Part Number: 595-TPS2121RUXR; Supplier 2: Digi-Key; Supplier 2 Part Number: 296-53410-2-ND; Supplier 3: thegioiic; Supplier 3 Part Number: N/A; ComponentLink1Description: Datasheet; ComponentLink1URL: https://www.ti.com/lit/gpn/tps2121
footprint TPS2121RUXR (QFN, 12-Leads, Body 2.00x2.50mm, Pitch 0.50mm/0.70mm, IPC Medium Density)
pins: 1 OUT, 2 IN2, 3 CP2, 4 OV2, 5 OV1, 6 PR1, 7 IN1, 8 OUT, 9 ST, 10 ILM, 11 SS, 12 GND

## TPS259470ARPWR
designator U?
2.7-V to 23-V, 28-mΩ, 5.5-A eFuse with integrated reverse polarity protection; Manufacturer: Texas Instruments; Input Voltage: 2.7-23V; Number of channels: 1; Output Current: 6A; Active status: Active; Device Type: eFuses and hot swap controllers; FET: Internal; Ron: 28 mOhm; Value: 6A; Output Voltage: 2.7-23V; Package / Case: VQFN-10; Current limit max: 6A; Supplier 1 URL: N/A; Supplier 2 URL: N/A; Supplier 3 URL: N/A; Manufacturer Part Number: TPS259470ARPWR; Mount: SMD/SMT; Operating Temperature Max: + 85 C; Operating Temperature Min: - 40 C; Packaging: Tape and Reel; Supplier 1: Mouser; Supplier 1 Part Number: 595-TPS259470ARPWR; Supplier 2: Digi-Key; Supplier 2 Part Number: 296-TPS259470ARPWRTR-ND; Supplier 3: thegioiic; Supplier 3 Part Number: N/A; ComponentLink1Description: Datasheet; ComponentLink1URL: https://www.ti.com/general/docs/suppproductinfo.tsp?distId=26&gotoUrl=https://www.ti.com/lit/gpn/tps25947
footprint TPS259470ARPWR (QFN, 16-Leads, Body 2.00x2.00mm, Pitch 0.50mm, IPC Medium Density)
pins: 1 EN/UVLO, 2 OVLO, 3 AUXOFF, 4 ~{FLT}, 5 IN, 6 OUT, 7 DVDT, 8 GND, 9 ILM, 10 ITIMER


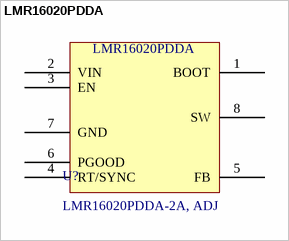
[diagram p5: symbol LMR16020PDDA]

## LMR16020PDDA
designator U?, comment LMR16020PDDA-2A, ADJ
Switching Voltage Regulators SIMPLE SWITCHER 60V, 2A Step-Down Converter with 40uA Iq 8-SO PowerPAD -40 to 125.; Manufacturer: Texas Instruments; Voltage Input: 4.3V - 60V; Manufacturer Part Number: LMR16020PDDA; Voltage Output: ADJ; Current Output: 2A; Supplier 1 URL: https://www.mouser.com/ProductDetail/Texas-Instruments/LMR16020PDDA?qs=n%252BTO0c4TDSZBajvStWOY0A%3D%3D; Supplier 2 URL: https://www.ti.com/lit/ds/symlink/lmr16020.pdf?HQS=dis-mous-null-mousermode-dsf-pf-null-wwe&ts=1689913563511&ref_url=https%253A%252F%252Fwww.mouser.com%252F; Supplier 3 URL: N/A; Value: LMR16020PDDA-2A, ADJ; Mount: SMD/SMT; Operating Temperature Max: + 85 C; Operating Temperature Min: - 40 C; Packaging: Tape and Reel; Supplier 1: Mouser; Supplier 1 Part Number: 595-LMR16020PDDA; Supplier 2: Digi-Key; Supplier 2 Part Number: 296-44512-5-ND; Supplier 3: thegioiic; Supplier 3 Part Number: N/A; ComponentLink1Description: Datasheet; ComponentLink1URL: https://www.ti.com/general/docs/suppproductinfo.tsp?distId=26&gotoUrl=https://www.ti.com/lit/gpn/lmr16020; Package / Case: SOIC-8
footprint LMR16020PDDA (SOIC, 8-Leads, Body 4.90x3.90mm, Pitch 1.27mm)
pins: 1 BOOT (power), 2 VIN (power), 3 EN (power), 4 RT/SYNC (power), 5 FB (power), 6 PGOOD (power), 7 GND (power), 8 SW (power)


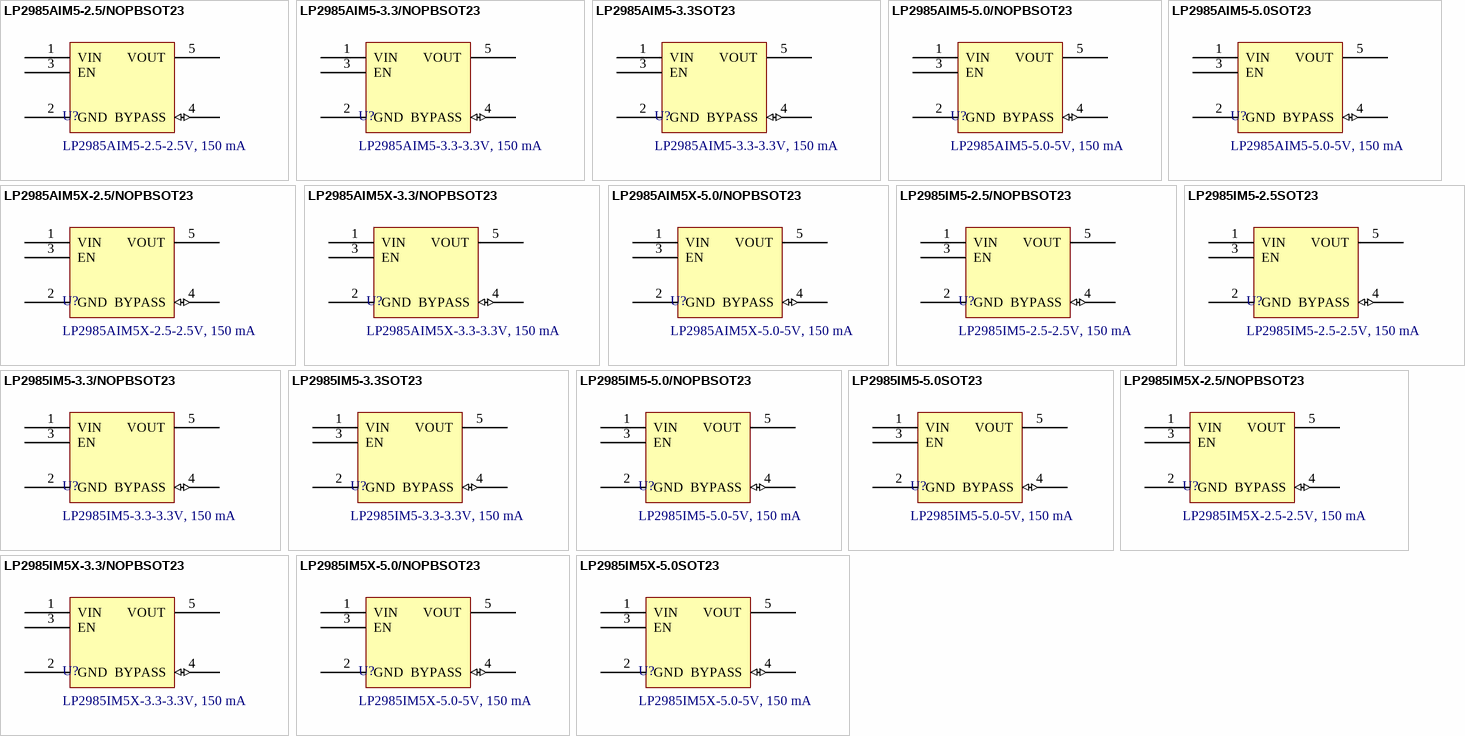
[diagram p6: symbols LP2985AIM5-2.5/NOPBSOT23 to LP2985IM5X-5.0SOT23]

## LP2985AIM5-2.5/NOPBSOT23
designator U?, comment LP2985AIM5-2.5-2.5V, 150 mA
Out: 2.5V, 150 mA max; In: 2.5 V to 16 V; Pacakge: SOT-23-5; Manufacturer: Texas Instruments; Voltage Input: 2.5V - 16V; Current Output: 150 mA; Supplier 1 URL: https://www.mouser.vn/ProductDetail/Texas-Instruments/LP2985AIM5-2.5-NOPB?qs=7lkVKPoqpbYqZbTWBUr%2FQA%3D%3D; Supplier 2 URL: https://www.digikey.com/en/products/detail/texas-instruments/LP2985AIM5-2-5-NOPB/364583; Supplier 3 URL: N/A; Value: LP2985AIM5-2.5-2.5V, 150 mA; Voltage Output: 2.5V; Manufacturer Part Number: LP2985AIM5-2.5; Mount: SMD/SMT; Operating Temperature Max: + 85 C; Operating Temperature Min: - 40 C; Package / Case: SOT-23-5; Packaging: Tape and Reel; Supplier 1: Mouser; Supplier 1 Part Number: 926-LP2985AIM525NOPB; Supplier 2: Digi-Key; Supplier 2 Part Number: LP2985AIM5-2.5/NOPBTR-ND; Supplier 3: thegioiic; Supplier 3 Part Number: N/A; ComponentLink1Description: Datasheet; ComponentLink1URL: https://www.ti.com/lit/ds/symlink/lp2985.pdf?ts=1690340207505&ref_url=https%253A%252F%252Fwww.ti.com%252Fproduct%252FLP2985%253FkeyMatch%253DLM2985
footprint SOT23-5 (SOT143-4 as used in SP0503BAHTG)
pins: 1 VIN (power) "Input supply pin. Use a capacitor with a value of 1 µF or larger from this pin to ground.", 2 GND, 3 EN "Enable pin for the LDO. Driving the ON/OFF pin high enables the device. Driving this pin low", 4 BYPASS (io) "BYPASS pin to achieve low noise performance. Connecting an external capacitor between", 5 VOUT (power) "Output of the regulator. Use a capacitor with a value of 2.2 µF or larger from this pin to"

## LP2985AIM5-3.3/NOPBSOT23
designator U?, comment LP2985AIM5-3.3-3.3V, 150 mA
Out: 3.3V, 150 mA max; In: 2.5 V to 16 V; Pacakge: SOT-23-5; Manufacturer: Texas Instruments; Voltage Input: 2.5V - 16V; Current Output: 150 mA; Supplier 1 URL: https://www.mouser.vn/ProductDetail/Texas-Instruments/LP2985AIM5-3.3-NOPB?qs=7lkVKPoqpba5AgutHXBYsA%3D%3D; Supplier 2 URL: https://www.digikey.com/en/products/detail/texas-instruments/LP2985AIM5-3-3-NOPB/364589?s=N4IgTCBcDaIDIAUwE4AcBWAggSQLLoFoBmAOiIHoA5AeQQCEQBdAXyA; Supplier 3 URL: https://www.thegioiic.com/lp2985-33dbvr-ic-on-ap-3-3v-150ma; Value: LP2985AIM5-3.3-3.3V, 150 mA; Voltage Output: 3.3V; Manufacturer Part Number: LP2985AIM5-3.3; Mount: SMD/SMT; Operating Temperature Max: + 85 C; Operating Temperature Min: - 40 C; Package / Case: SOT-23-5; Packaging: Tape and Reel; Supplier 1: Mouser; Supplier 1 Part Number: 926-2985AIM53.3/NOPB; Supplier 2: Digi-Key; Supplier 2 Part Number: LP2985AIM5-3.3/NOPBTR-ND; Supplier 3: thegioiic; Supplier 3 Part Number: N/A; ComponentLink1Description: Datasheet; ComponentLink1URL: https://www.ti.com/lit/ds/symlink/lp2985.pdf?ts=1690340207505&ref_url=https%253A%252F%252Fwww.ti.com%252Fproduct%252FLP2985%253FkeyMatch%253DLM2985
footprint SOT23-5 (SOT143-4 as used in SP0503BAHTG)
pins: 1 VIN (power) "Input supply pin. Use a capacitor with a value of 1 µF or larger from this pin to ground.", 2 GND, 3 EN "Enable pin for the LDO. Driving the ON/OFF pin high enables the device. Driving this pin low", 4 BYPASS (io) "BYPASS pin to achieve low noise performance. Connecting an external capacitor between", 5 VOUT (power) "Output of the regulator. Use a capacitor with a value of 2.2 µF or larger from this pin to"

## LP2985AIM5-3.3SOT23
designator U?, comment LP2985AIM5-3.3-3.3V, 150 mA
Out: 3.3V, 150 mA max; In: 2.5 V to 16 V; Pacakge: SOT-23-5; Manufacturer: Texas Instruments; Voltage Input: 2.5V - 16V; Current Output: 150 mA; Supplier 1 URL: https://www.mouser.vn/ProductDetail/Texas-Instruments/LP2985AIM5-3.3?qs=7lkVKPoqpbarLAafn%252BUbQg%3D%3D; Supplier 2 URL: https://www.digikey.com/en/products/detail/texas-instruments/LP2985AIM5-3-3/3698168; Supplier 3 URL: https://www.thegioiic.com/lp2985-33dbvr-ic-on-ap-3-3v-150ma; Value: LP2985AIM5-3.3-3.3V, 150 mA; Voltage Output: 3.3V; Manufacturer Part Number: LP2985AIM5-3.3; Mount: SMD/SMT; Operating Temperature Max: + 85 C; Operating Temperature Min: - 40 C; Package / Case: SOT-23-5; Packaging: Tape and Reel; Supplier 1: Mouser; Supplier 1 Part Number: 926-LP2985AIM5-33; Supplier 2: Digi-Key; Supplier 2 Part Number: 296-35910-2-ND; Supplier 3: thegioiic; Supplier 3 Part Number: N/A; ComponentLink1Description: Datasheet; ComponentLink1URL: https://www.ti.com/lit/ds/symlink/lp2985.pdf?ts=1690340207505&ref_url=https%253A%252F%252Fwww.ti.com%252Fproduct%252FLP2985%253FkeyMatch%253DLM2985
footprint SOT23-5 (SOT143-4 as used in SP0503BAHTG)
pins: 1 VIN (power) "Input supply pin. Use a capacitor with a value of 1 µF or larger from this pin to ground.", 2 GND, 3 EN "Enable pin for the LDO. Driving the ON/OFF pin high enables the device. Driving this pin low", 4 BYPASS (io) "BYPASS pin to achieve low noise performance. Connecting an external capacitor between", 5 VOUT (power) "Output of the regulator. Use a capacitor with a value of 2.2 µF or larger from this pin to"

## LP2985AIM5-5.0/NOPBSOT23
designator U?, comment LP2985AIM5-5.0-5V, 150 mA
Out: 5V, 150 mA max; In: 2.5 V to 16 V; Pacakge: SOT-23-5; Manufacturer: Texas Instruments; Voltage Input: 2.5V - 16V; Current Output: 150 mA; Supplier 1 URL: https://www.mouser.vn/ProductDetail/Texas-Instruments/LP2985AIM5-5.0-NOPB?qs=7lkVKPoqpbYsAhhQ4Pn4Tg%3D%3D; Supplier 2 URL: https://www.digikey.com/en/products/detail/texas-instruments/LP2985AIM5-5-0-NOPB/364591?s=N4IgTCBcDaIDIAUwE4AcBWAggSQLLoFp0A6ABgHoA5AeQQCEQBdAXyA; Supplier 3 URL: N/A; Value: LP2985AIM5-5.0-5V, 150 mA; Voltage Output: 5V; Manufacturer Part Number: LP2985AIM5-5.0; Mount: SMD/SMT; Operating Temperature Max: + 85 C; Operating Temperature Min: - 40 C; Package / Case: SOT-23-5; Packaging: Tape and Reel; Supplier 1: Mouser; Supplier 1 Part Number: 926-LP2985AIM550NOPB; Supplier 2: Digi-Key; Supplier 2 Part Number: LP2985AIM5-5.0/NOPBTR-ND; Supplier 3: thegioiic; Supplier 3 Part Number: N/A; ComponentLink1Description: Datasheet; ComponentLink1URL: https://www.ti.com/lit/ds/symlink/lp2985.pdf?ts=1690340207505&ref_url=https%253A%252F%252Fwww.ti.com%252Fproduct%252FLP2985%253FkeyMatch%253DLM2985
footprint SOT23-5 (SOT143-4 as used in SP0503BAHTG)
pins: 1 VIN (power) "Input supply pin. Use a capacitor with a value of 1 µF or larger from this pin to ground.", 2 GND, 3 EN "Enable pin for the LDO. Driving the ON/OFF pin high enables the device. Driving this pin low", 4 BYPASS (io) "BYPASS pin to achieve low noise performance. Connecting an external capacitor between", 5 VOUT (power) "Output of the regulator. Use a capacitor with a value of 2.2 µF or larger from this pin to"